# Altium schematic symbol library ADXL312ACPZ.SchLib: 1 symbol
Pins are listed as number, name and electrical type; pins without a type are passive.

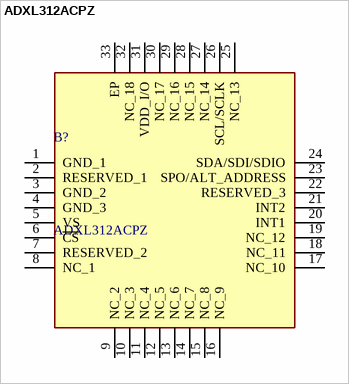
[diagram p0: symbol ADXL312ACPZ]

## ADXL312ACPZ
designator B?
Analog Devices ADXL312ACPZ 3-Axis Accelerometer IC, 2  3.6 V 32-Pin LFCSP LQ; Geometry.Height: 1.55mm; Mouser Part Number: 584-ADXL312ACPZ; Mouser Price/Stock: https://www.mouser.co.uk/ProductDetail/Analog-Devices/ADXL312ACPZ?qs=WIvQP4zGanh2mViyx1IC4g%3D%3D; Manufacturer_Name: Analog Devices; Manufacturer_Part_Number: ADXL312ACPZ; Datasheet Link: https://www.analog.com/media/en/technical-documentation/data-sheets/ADXL312.pdf
footprint QFN50P500X500X155-33N-D
pins: 1 GND_1, 2 RESERVED_1, 3 GND_2, 4 GND_3, 5 VS, 6 ~{CS}, 7 RESERVED_2, 8 NC_1, 9 NC_2, 10 NC_3, 11 NC_4, 12 NC_5, 13 NC_6, 14 NC_7, 15 NC_8, 16 NC_9, 17 NC_10, 18 NC_11, 19 NC_12, 20 INT1, 21 INT2, 22 RESERVED_3, 23 SPO/ALT_ADDRESS, 24 SDA/SDI/SDIO, 25 NC_13, 26 SCL/SCLK, 27 NC_14, 28 NC_15, 29 NC_16, 30 NC_17, 31 VDD_I/O, 32 NC_18, 33 EP